# Altium footprint library EEE-FK1E101P.PcbLib: 3 footprints
Each footprint in its own frame and in the unit in brackets; x right, y up, seen from the top. Pads: shape width x height; smd on the part's side, far side on the other; paste and mask are expansions set on the pad; w line width, h text height; cw(c..) or ccw(c..) is an arc to the next point about the centre after c.
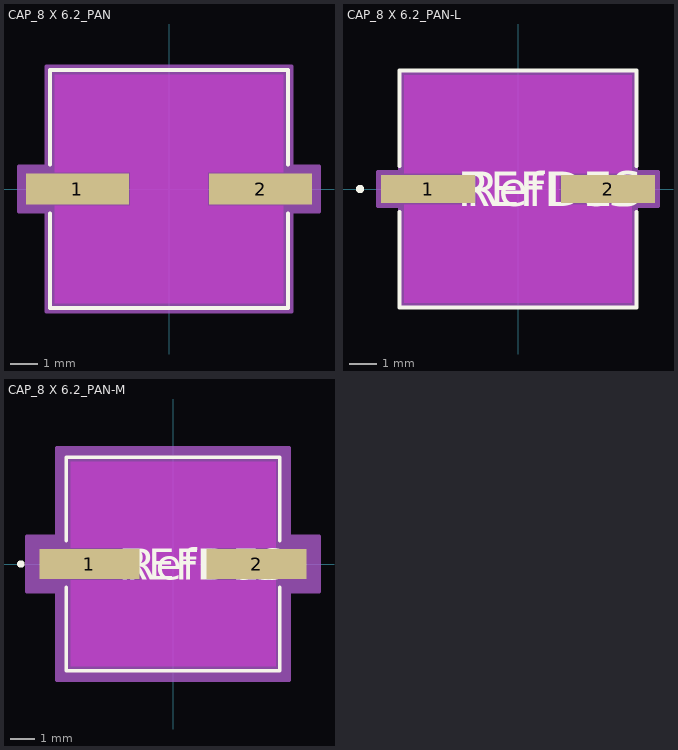
[diagram p0: the footprints below, top view; thin cyan lines are the x and y axes]

## CAP_8 X 6.2_PAN [mil]
pads (2):
  rect 149x45 smd paste+0 mask+0: 1(-132.5,0) 2(132.5,0)
Top Layer keep-out:
  region: -165,-165 -165,-24.5 165,-24.5 165,-165
  region: -165,24.5 -165,165 165,165 165,24.5
  region: -56,-24.5 -56,24.5 56,24.5 56,-24.5
Top Overlay:
  lines w6: -172,-35.6 -172,-172 172,-172 172,-35.6 ; -172,35.6 -172,172 172,172 172,35.6
Keep-Out Layer:
  region: -56,-24.5 -56,24.5 56,24.5 56,-24.5
Mechanical 13:
  lines w1: -167,-83.5 -83.5,-167 ; -167,83.5 -83.5,167 ; -167,-167 -167,167 167,167 167,-167 -167,-167
Mechanical 15:
  region: -177,-32.5 -217,-32.5 -217,32.5 -177,32.5 -177,177 177,177 177,32.5 217,32.5 217,-32.5 177,-32.5 177,-177 -177,-177
  lines w6: -217,-32.5 -177,-32.5 -177,-177 177,-177 177,-32.5 217,-32.5 217,32.5 177,32.5 177,177 -177,177 -177,32.5 -217,32.5 -217,-32.5
3D body "CAP_8X62_PAN.step": height 250.12, standoff 0, extent -187.01,-167.01 187.01,167.01

## CAP_8 X 6.2_PAN-L [mil]
pads (2):
  rect 137x41 smd paste+0 mask+0: 1(-130.5,0) 2(130.5,0)
Top Layer keep-out:
  region: -60,-22.5 -60,22.5 60,22.5 60,-22.5
  region: -165,22.5 -165,165 165,165 165,22.5
  region: -165,-165 -165,-22.5 165,-22.5 165,-165
Top Overlay:
  circle w6: c-229,0 r3
  lines w6: -172,-33.6 -172,-172 172,-172 172,-33.6 ; -172,33.6 -172,172 172,172 172,33.6
  text "RefDes" at -75,-25 h50
  text "REFDES" at -87.5,-25 h50
Keep-Out Layer:
  region: -60,-22.5 -60,22.5 60,22.5 60,-22.5
Mechanical 13:
  circle w0: c-147,0 r3
  lines w1: -167,-83.5 -83.5,-167 ; -167,83.5 -83.5,167 ; -167,-167 167,-167 167,167 -167,167 -167,-167
  text "RefDes2" at -87.5,-25 h50
Mechanical 15:
  region: -171,-24.5 -203,-24.5 -203,24.5 -171,24.5 -171,171 171,171 171,24.5 203,24.5 203,-24.5 171,-24.5 171,-171 -171,-171
  lines w6: -203,-24.5 -203,24.5 -171,24.5 -171,171 171,171 171,24.5 203,24.5 203,-24.5 171,-24.5 171,-171 -171,-171 -171,-24.5 -203,-24.5
3D body: height 10, standoff 0, extent 0,0 10,10

## CAP_8 X 6.2_PAN-M [mil]
pads (2):
  rect 161x49 smd paste+0 mask+0: 1(-134.5,0) 2(134.5,0)
Top Layer keep-out:
  region: -52,-26.5 -52,26.5 52,26.5 52,-26.5
  region: -165,26.5 -165,165 165,165 165,26.5
  region: -165,-165 -165,-26.5 165,-26.5 165,-165
Top Overlay:
  circle w6: c-245,0 r3
  lines w6: -172,-37.6 -172,-172 172,-172 172,-37.6 ; -172,37.6 -172,172 172,172 172,37.6
  text "RefDes" at -75,-25 h50
  text "REFDES" at -87.5,-25 h50
Keep-Out Layer:
  region: -52,-26.5 -52,26.5 52,26.5 52,-26.5
Mechanical 13:
  circle w0: c-147,0 r3
  lines w1: -167,-83.5 -83.5,-167 ; -167,83.5 -83.5,167 ; -167,-167 167,-167 167,167 -167,167 -167,-167
  text "RefDes2" at -87.5,-25 h50
Mechanical 15:
  region: -187,-44.5 -235,-44.5 -235,44.5 -187,44.5 -187,187 187,187 187,44.5 235,44.5 235,-44.5 187,-44.5 187,-187 -187,-187
  lines w6: -235,-44.5 -235,44.5 -187,44.5 -187,187 187,187 187,44.5 235,44.5 235,-44.5 187,-44.5 187,-187 -187,-187 -187,-44.5 -235,-44.5
3D body: height 10, standoff 0, extent 0,0 10,10